# Altium footprint library MY_LIB_Connectors.PcbLib: 358 footprints (part 19 of 23)
Each footprint in its own frame and in the unit in brackets; x right, y up, seen from the top. Pads: shape width x height; smd on the part's side, far side on the other; paste and mask are expansions set on the pad; w line width, h text height; cw(c..) or ccw(c..) is an arc to the next point about the centre after c.
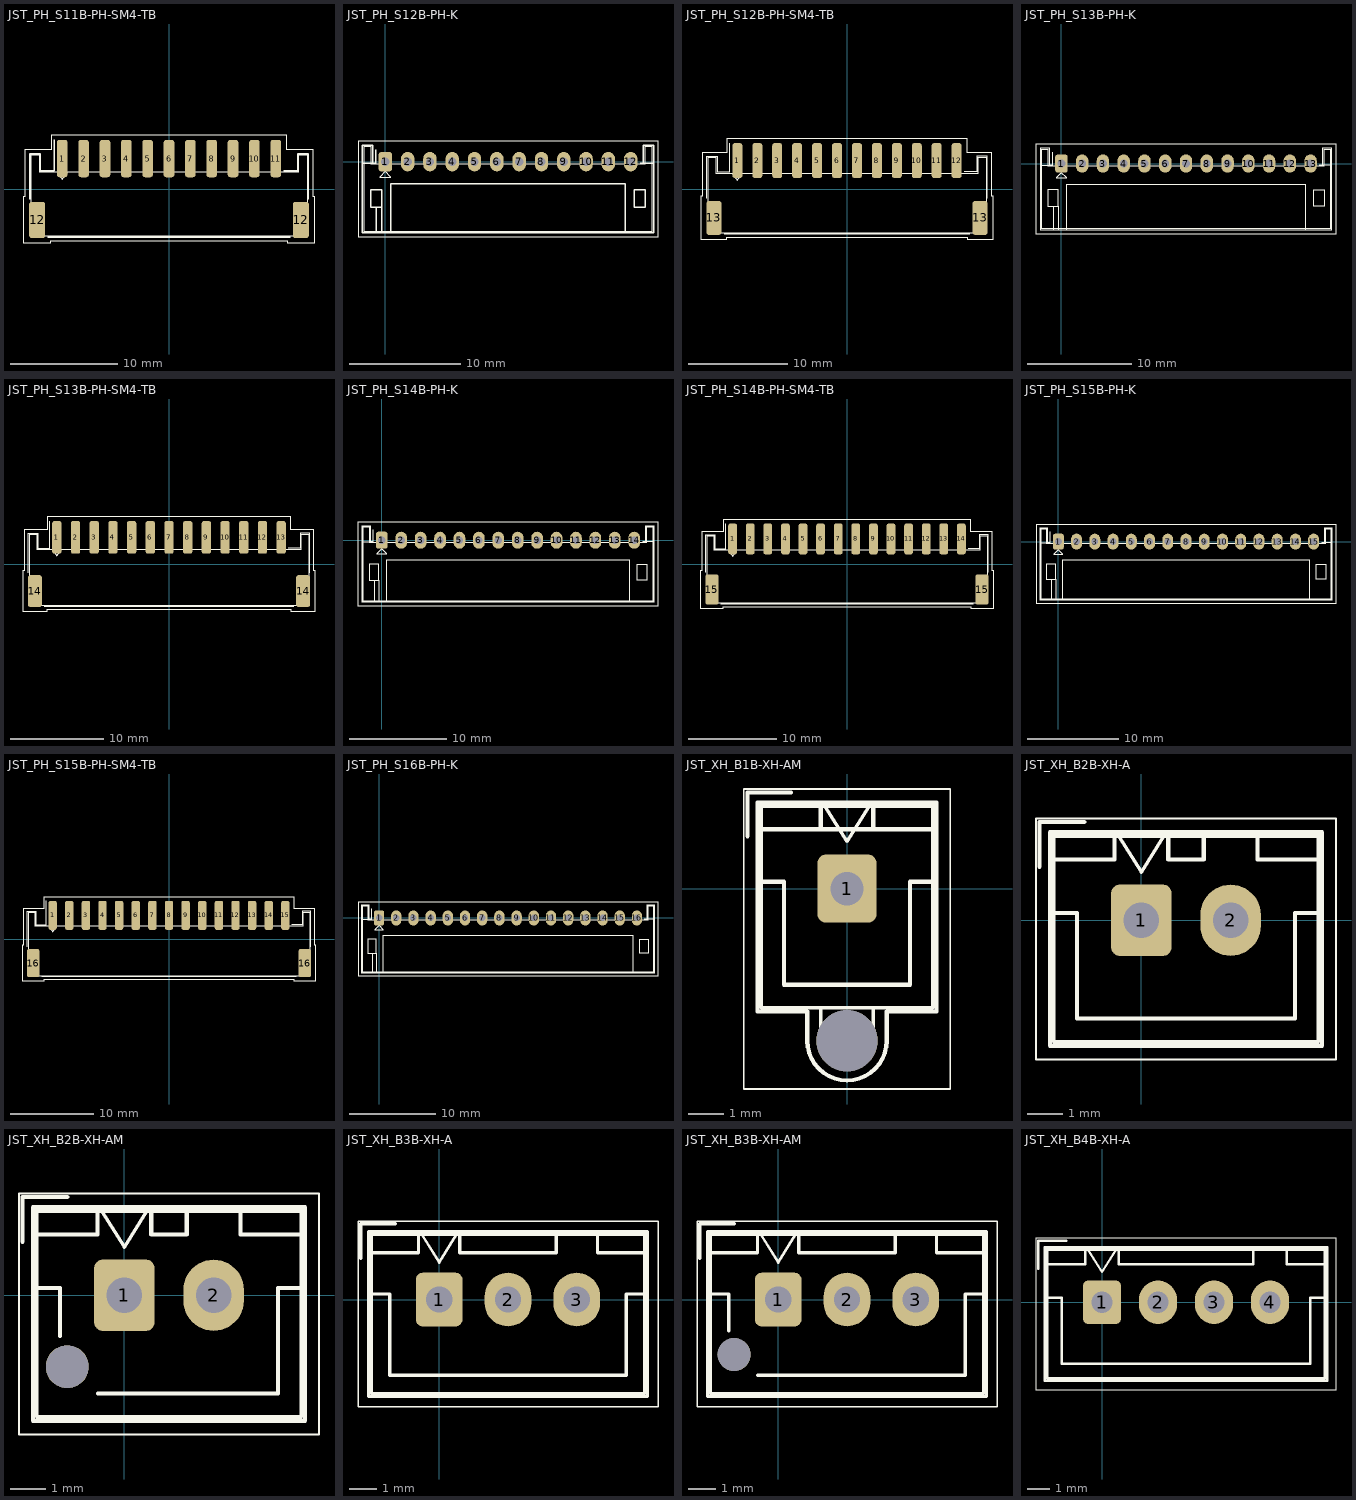
[diagram p18: the footprints below, top view; thin cyan lines are the x and y axes]

## JST_PH_S11B-PH-SM4-TB [mm] "JST S11B-PH-SM4-TB; reviewed KiCad footprint; ready STEP reference model"
height 5.588
pads (13):
  rrect50% 1x3.5 all layers, no hole: 1(-10,2.85) 2(-8,2.85) 3(-6,2.85) 4(-4,2.85) 5(-2,2.85) 6(0,2.85) 7(2,2.85) 8(4,2.85) 9(6,2.85) 10(8,2.85) 11(10,2.85)
  rrect33% 1.5x3.4 all layers, no hole: 12(-12.35,-2.9) 12(12.35,-2.9)
Top Overlay:
  lines w0.05: -13.6,-5.1 -13.6,-0.69 -13.45,-0.69 -13.45,3.7 -11,3.7 -11,5.1 11,5.1 11,3.7 13.45,3.7 13.45,-0.69 13.6,-0.69 13.6,-5.1 11.1,-5.1 11.1,-4.9 -11.1,-4.9 -11.1,-5.1 -13.6,-5.1
  lines w0.1: -10.5,1.6 -10,0.893 -9.5,1.6 ; -12.95,-4.4 -12.95,3.2 -12.15,3.2 -12.15,1.6 12.15,1.6 12.15,3.2 12.95,3.2 12.95,-4.4 -12.95,-4.4
  lines w0.12: -13.06,-0.94 -13.06,3.31 -12.04,3.31 -12.04,1.71 -10.76,1.71 -10.76,4.6 ; -11.34,-4.51 11.34,-4.51 ; 10.76,1.71 12.04,1.71 12.04,3.31 13.06,3.31 13.06,-0.94
3D body "s11b-ph-sm4-tb.step": height 5.59, standoff 0, extent -12.95,-4.4 12.95,3.2

## JST_PH_S12B-PH-K [mm] "JST S12B-PH-K; reviewed KiCad footprint; ready STEP reference model"
height 4.85
pads (12):
  rrect42% 1.2x1.75 hole 0.75: 1(0,0)
  oval 1.2x1.75 hole 0.75: 2(2,0) 3(4,0) 4(6,0) 5(8,0) 6(10,0) 7(12,0) 8(14,0) 9(16,0) 10(18,0) 11(20,0) 12(22,0)
Top Overlay:
  lines w0.05: -2.45,-6.75 -2.45,1.85 24.45,1.85 24.45,-6.75 -2.45,-6.75
  lines w0.1: -1.95,-6.25 -1.95,1.35 -1.25,1.35 -1.25,-0.25 23.25,-0.25 23.25,1.35 23.95,1.35 23.95,-6.25 -1.95,-6.25 ; -0.5,-1.375 0.5,-1.375 0,-0.875 -0.5,-1.375
  lines w0.12: -2.06,-0.14 -1.14,-0.14 ; -0.86,1.075 -0.86,-0.14 -1.14,-0.14 ; -0.8,-6.36 -0.8,-4.1 ; -0.3,-6.36 -0.3,-4.1 ; 0.5,-6.36 0.5,-2 21.5,-2 21.5,-6.36 ; 22.86,-0.14 23.14,-0.14 ; 24.06,-0.14 23.14,-0.14 ; -1.14,-0.14 -1.14,1.46 -2.06,1.46 -2.06,-6.36 24.06,-6.36 24.06,1.46 23.14,1.46 23.14,-0.14 ; -0.3,-4.1 -1.3,-4.1 -1.3,-2.5 -0.3,-2.5 -0.3,-4.1 ; 22.3,-4.1 22.3,-2.5 23.3,-2.5 23.3,-4.1 22.3,-4.1
3D body "JST_PH_S12B-PH-K_1x12_P2.00mm_Horizontal.step": height 4.85, standoff -3.4, extent -1.95,-6.25 23.95,1.35

## JST_PH_S12B-PH-SM4-TB [mm] "JST S12B-PH-SM4-TB; reviewed KiCad footprint; ready STEP reference model"
height 5.588
pads (14):
  rrect50% 1x3.5 all layers, no hole: 1(-11,2.85) 2(-9,2.85) 3(-7,2.85) 4(-5,2.85) 5(-3,2.85) 6(-1,2.85) 7(1,2.85) 8(3,2.85) 9(5,2.85) 10(7,2.85) 11(9,2.85) 12(11,2.85)
  rrect33% 1.5x3.4 all layers, no hole: 13(-13.35,-2.9) 13(13.35,-2.9)
Top Overlay:
  lines w0.05: -14.6,-5.1 -14.6,-0.69 -14.45,-0.69 -14.45,3.7 -12,3.7 -12,5.1 12,5.1 12,3.7 14.45,3.7 14.45,-0.69 14.6,-0.69 14.6,-5.1 12.1,-5.1 12.1,-4.9 -12.1,-4.9 -12.1,-5.1 -14.6,-5.1
  lines w0.1: -11.5,1.6 -11,0.893 -10.5,1.6 ; -13.95,-4.4 -13.95,3.2 -13.15,3.2 -13.15,1.6 13.15,1.6 13.15,3.2 13.95,3.2 13.95,-4.4 -13.95,-4.4
  lines w0.12: -14.06,-0.94 -14.06,3.31 -13.04,3.31 -13.04,1.71 -11.76,1.71 -11.76,4.6 ; -12.34,-4.51 12.34,-4.51 ; 11.76,1.71 13.04,1.71 13.04,3.31 14.06,3.31 14.06,-0.94
3D body "s12b-ph-sm4-tb.step": height 5.59, standoff 0, extent -13.95,-4.4 13.95,3.2

## JST_PH_S13B-PH-K [mm] "JST S13B-PH-K; reviewed KiCad footprint; ready STEP reference model"
height 4.85
pads (13):
  rrect42% 1.2x1.75 hole 0.75: 1(0,0)
  oval 1.2x1.75 hole 0.75: 2(2,0) 3(4,0) 4(6,0) 5(8,0) 6(10,0) 7(12,0) 8(14,0) 9(16,0) 10(18,0) 11(20,0) 12(22,0) 13(24,0)
Top Overlay:
  lines w0.05: -2.45,-6.75 -2.45,1.85 26.45,1.85 26.45,-6.75 -2.45,-6.75
  lines w0.1: -1.95,-6.25 -1.95,1.35 -1.25,1.35 -1.25,-0.25 25.25,-0.25 25.25,1.35 25.95,1.35 25.95,-6.25 -1.95,-6.25 ; -0.5,-1.375 0.5,-1.375 0,-0.875 -0.5,-1.375
  lines w0.12: -2.06,-0.14 -1.14,-0.14 ; -0.86,1.075 -0.86,-0.14 -1.14,-0.14 ; -0.8,-6.36 -0.8,-4.1 ; -0.3,-6.36 -0.3,-4.1 ; 0.5,-6.36 0.5,-2 23.5,-2 23.5,-6.36 ; 24.86,-0.14 25.14,-0.14 ; 26.06,-0.14 25.14,-0.14 ; -1.14,-0.14 -1.14,1.46 -2.06,1.46 -2.06,-6.36 26.06,-6.36 26.06,1.46 25.14,1.46 25.14,-0.14 ; -0.3,-4.1 -1.3,-4.1 -1.3,-2.5 -0.3,-2.5 -0.3,-4.1 ; 24.3,-4.1 24.3,-2.5 25.3,-2.5 25.3,-4.1 24.3,-4.1
3D body "JST_PH_S13B-PH-K_1x13_P2.00mm_Horizontal.step": height 4.85, standoff -3.4, extent -1.95,-6.25 25.95,1.35

## JST_PH_S13B-PH-SM4-TB [mm] "JST S13B-PH-SM4-TB; reviewed KiCad footprint; ready STEP reference model"
height 5.588
pads (15):
  rrect50% 1x3.5 all layers, no hole: 1(-12,2.85) 2(-10,2.85) 3(-8,2.85) 4(-6,2.85) 5(-4,2.85) 6(-2,2.85) 7(0,2.85) 8(2,2.85) 9(4,2.85) 10(6,2.85) 11(8,2.85) 12(10,2.85) 13(12,2.85)
  rrect33% 1.5x3.4 all layers, no hole: 14(-14.35,-2.9) 14(14.35,-2.9)
Top Overlay:
  lines w0.05: -15.6,-5.1 -15.6,-0.69 -15.45,-0.69 -15.45,3.7 -13,3.7 -13,5.1 13,5.1 13,3.7 15.45,3.7 15.45,-0.69 15.6,-0.69 15.6,-5.1 13.1,-5.1 13.1,-4.9 -13.1,-4.9 -13.1,-5.1 -15.6,-5.1
  lines w0.1: -12.5,1.6 -12,0.893 -11.5,1.6 ; -14.95,-4.4 -14.95,3.2 -14.15,3.2 -14.15,1.6 14.15,1.6 14.15,3.2 14.95,3.2 14.95,-4.4 -14.95,-4.4
  lines w0.12: -15.06,-0.94 -15.06,3.31 -14.04,3.31 -14.04,1.71 -12.76,1.71 -12.76,4.6 ; -13.34,-4.51 13.34,-4.51 ; 12.76,1.71 14.04,1.71 14.04,3.31 15.06,3.31 15.06,-0.94
3D body "s13b-ph-sm4-tb.step": height 5.59, standoff 0, extent -14.95,-4.4 14.95,3.2

## JST_PH_S14B-PH-K [mm] "JST S14B-PH-K; reviewed KiCad footprint; ready STEP reference model"
height 4.85
pads (14):
  rrect42% 1.2x1.75 hole 0.75: 1(0,0)
  oval 1.2x1.75 hole 0.75: 2(2,0) 3(4,0) 4(6,0) 5(8,0) 6(10,0) 7(12,0) 8(14,0) 9(16,0) 10(18,0) 11(20,0) 12(22,0) 13(24,0) 14(26,0)
Top Overlay:
  lines w0.05: -2.45,-6.75 -2.45,1.85 28.45,1.85 28.45,-6.75 -2.45,-6.75
  lines w0.1: -1.95,-6.25 -1.95,1.35 -1.25,1.35 -1.25,-0.25 27.25,-0.25 27.25,1.35 27.95,1.35 27.95,-6.25 -1.95,-6.25 ; -0.5,-1.375 0.5,-1.375 0,-0.875 -0.5,-1.375
  lines w0.12: -2.06,-0.14 -1.14,-0.14 ; -0.86,1.075 -0.86,-0.14 -1.14,-0.14 ; -0.8,-6.36 -0.8,-4.1 ; -0.3,-6.36 -0.3,-4.1 ; 0.5,-6.36 0.5,-2 25.5,-2 25.5,-6.36 ; 26.86,-0.14 27.14,-0.14 ; 28.06,-0.14 27.14,-0.14 ; -1.14,-0.14 -1.14,1.46 -2.06,1.46 -2.06,-6.36 28.06,-6.36 28.06,1.46 27.14,1.46 27.14,-0.14 ; -0.3,-4.1 -1.3,-4.1 -1.3,-2.5 -0.3,-2.5 -0.3,-4.1 ; 26.3,-4.1 26.3,-2.5 27.3,-2.5 27.3,-4.1 26.3,-4.1
3D body "JST_PH_S14B-PH-K_1x14_P2.00mm_Horizontal.step": height 4.85, standoff -3.4, extent -1.95,-6.25 27.95,1.35

## JST_PH_S14B-PH-SM4-TB [mm] "JST S14B-PH-SM4-TB; reviewed KiCad footprint; ready STEP reference model"
height 5.588
pads (16):
  rrect50% 1x3.5 all layers, no hole: 1(-13,2.85) 2(-11,2.85) 3(-9,2.85) 4(-7,2.85) 5(-5,2.85) 6(-3,2.85) 7(-1,2.85) 8(1,2.85) 9(3,2.85) 10(5,2.85) 11(7,2.85) 12(9,2.85) 13(11,2.85) 14(13,2.85)
  rrect33% 1.5x3.4 all layers, no hole: 15(-15.35,-2.9) 15(15.35,-2.9)
Top Overlay:
  lines w0.05: -16.6,-5.1 -16.6,-0.69 -16.45,-0.69 -16.45,3.7 -14,3.7 -14,5.1 14,5.1 14,3.7 16.45,3.7 16.45,-0.69 16.6,-0.69 16.6,-5.1 14.1,-5.1 14.1,-4.9 -14.1,-4.9 -14.1,-5.1 -16.6,-5.1
  lines w0.1: -13.5,1.6 -13,0.893 -12.5,1.6 ; -15.95,-4.4 -15.95,3.2 -15.15,3.2 -15.15,1.6 15.15,1.6 15.15,3.2 15.95,3.2 15.95,-4.4 -15.95,-4.4
  lines w0.12: -16.06,-0.94 -16.06,3.31 -15.04,3.31 -15.04,1.71 -13.76,1.71 -13.76,4.6 ; -14.34,-4.51 14.34,-4.51 ; 13.76,1.71 15.04,1.71 15.04,3.31 16.06,3.31 16.06,-0.94
3D body "s14b-ph-sm4-tb.step": height 5.59, standoff 0, extent -15.95,-4.4 15.95,3.2

## JST_PH_S15B-PH-K [mm] "JST S15B-PH-K; reviewed KiCad footprint; ready STEP reference model"
height 4.85
pads (15):
  rrect42% 1.2x1.75 hole 0.75: 1(0,0)
  oval 1.2x1.75 hole 0.75: 2(2,0) 3(4,0) 4(6,0) 5(8,0) 6(10,0) 7(12,0) 8(14,0) 9(16,0) 10(18,0) 11(20,0) 12(22,0) 13(24,0) 14(26,0) 15(28,0)
Top Overlay:
  lines w0.05: -2.45,-6.75 -2.45,1.85 30.45,1.85 30.45,-6.75 -2.45,-6.75
  lines w0.1: -1.95,-6.25 -1.95,1.35 -1.25,1.35 -1.25,-0.25 29.25,-0.25 29.25,1.35 29.95,1.35 29.95,-6.25 -1.95,-6.25 ; -0.5,-1.375 0.5,-1.375 0,-0.875 -0.5,-1.375
  lines w0.12: -2.06,-0.14 -1.14,-0.14 ; -0.86,1.075 -0.86,-0.14 -1.14,-0.14 ; -0.8,-6.36 -0.8,-4.1 ; -0.3,-6.36 -0.3,-4.1 ; 0.5,-6.36 0.5,-2 27.5,-2 27.5,-6.36 ; 28.86,-0.14 29.14,-0.14 ; 30.06,-0.14 29.14,-0.14 ; -1.14,-0.14 -1.14,1.46 -2.06,1.46 -2.06,-6.36 30.06,-6.36 30.06,1.46 29.14,1.46 29.14,-0.14 ; -0.3,-4.1 -1.3,-4.1 -1.3,-2.5 -0.3,-2.5 -0.3,-4.1 ; 28.3,-4.1 28.3,-2.5 29.3,-2.5 29.3,-4.1 28.3,-4.1
3D body "JST_PH_S15B-PH-K_1x15_P2.00mm_Horizontal.step": height 4.85, standoff -3.4, extent -1.95,-6.25 29.95,1.35

## JST_PH_S15B-PH-SM4-TB [mm] "JST S15B-PH-SM4-TB; reviewed KiCad footprint; ready STEP reference model"
height 5.588
pads (17):
  rrect50% 1x3.5 all layers, no hole: 1(-14,2.85) 2(-12,2.85) 3(-10,2.85) 4(-8,2.85) 5(-6,2.85) 6(-4,2.85) 7(-2,2.85) 8(0,2.85) 9(2,2.85) 10(4,2.85) 11(6,2.85) 12(8,2.85) 13(10,2.85) 14(12,2.85) 15(14,2.85)
  rrect33% 1.5x3.4 all layers, no hole: 16(-16.35,-2.9) 16(16.35,-2.9)
Top Overlay:
  lines w0.05: -17.6,-5.1 -17.6,-0.69 -17.45,-0.69 -17.45,3.7 -15,3.7 -15,5.1 15,5.1 15,3.7 17.45,3.7 17.45,-0.69 17.6,-0.69 17.6,-5.1 15.1,-5.1 15.1,-4.9 -15.1,-4.9 -15.1,-5.1 -17.6,-5.1
  lines w0.1: -14.5,1.6 -14,0.893 -13.5,1.6 ; -16.95,-4.4 -16.95,3.2 -16.15,3.2 -16.15,1.6 16.15,1.6 16.15,3.2 16.95,3.2 16.95,-4.4 -16.95,-4.4
  lines w0.12: -17.06,-0.94 -17.06,3.31 -16.04,3.31 -16.04,1.71 -14.76,1.71 -14.76,4.6 ; -15.34,-4.51 15.34,-4.51 ; 14.76,1.71 16.04,1.71 16.04,3.31 17.06,3.31 17.06,-0.94
3D body "s15b-ph-sm4-tb.step": height 5.59, standoff 0, extent -16.95,-4.4 16.95,3.2

## JST_PH_S16B-PH-K [mm] "JST S16B-PH-K; reviewed KiCad footprint; ready STEP reference model"
height 4.85
pads (16):
  rrect42% 1.2x1.75 hole 0.75: 1(0,0)
  oval 1.2x1.75 hole 0.75: 2(2,0) 3(4,0) 4(6,0) 5(8,0) 6(10,0) 7(12,0) 8(14,0) 9(16,0) 10(18,0) 11(20,0) 12(22,0) 13(24,0) 14(26,0) 15(28,0) 16(30,0)
Top Overlay:
  lines w0.05: -2.45,-6.75 -2.45,1.85 32.45,1.85 32.45,-6.75 -2.45,-6.75
  lines w0.1: -1.95,-6.25 -1.95,1.35 -1.25,1.35 -1.25,-0.25 31.25,-0.25 31.25,1.35 31.95,1.35 31.95,-6.25 -1.95,-6.25 ; -0.5,-1.375 0.5,-1.375 0,-0.875 -0.5,-1.375
  lines w0.12: -2.06,-0.14 -1.14,-0.14 ; -0.86,1.075 -0.86,-0.14 -1.14,-0.14 ; -0.8,-6.36 -0.8,-4.1 ; -0.3,-6.36 -0.3,-4.1 ; 0.5,-6.36 0.5,-2 29.5,-2 29.5,-6.36 ; 30.86,-0.14 31.14,-0.14 ; 32.06,-0.14 31.14,-0.14 ; -1.14,-0.14 -1.14,1.46 -2.06,1.46 -2.06,-6.36 32.06,-6.36 32.06,1.46 31.14,1.46 31.14,-0.14 ; -0.3,-4.1 -1.3,-4.1 -1.3,-2.5 -0.3,-2.5 -0.3,-4.1 ; 30.3,-4.1 30.3,-2.5 31.3,-2.5 31.3,-4.1 30.3,-4.1
3D body "JST_PH_S16B-PH-K_1x16_P2.00mm_Horizontal.step": height 4.85, standoff -3.4, extent -1.95,-6.25 31.95,1.35

## JST_XH_B1B-XH-AM [mm] "JST B1B-XH-AM; reviewed KiCad footprint; ready STEP reference model"
height 7
pads (2):
  rrect29% 1.7x1.95 hole 0.95: 1(0,0)
  round 1.75 hole 1.75 unplated: ""(0,-4.35)
Top Overlay:
  lines w0.05: -2.95,-5.73 -2.95,2.85 2.95,2.85 2.95,-5.73 -2.95,-5.73
  lines w0.1: -0.625,2.35 0,1.35 0.625,2.35 ; -2.45,-3.4 -2.45,2.35 ; -2.45,-3.4 -2.45,2.35 ; -2.45,-3.4 2.45,-3.4 ; -2.45,-3.4 -0.75,-3.4 -0.75,-4.35 ccw(c0,-4.35) 0.75,-4.35 0.75,-3.4 2.45,-3.4 ; -2.45,2.35 2.45,2.35 ; -2.45,2.35 2.45,2.35 ; 2.45,-3.4 2.45,2.35 ; 2.45,-3.4 2.45,2.35
  lines w0.12: -2.85,1.5 -2.85,2.75 -1.6,2.75 ; -2.55,0.2 -1.8,0.2 -1.8,-2.75 0,-2.75 1.8,-2.75 1.8,0.2 2.55,0.2 ; -0.75,1.7 -2.55,1.7 -2.55,2.45 -0.75,2.45 ; -0.75,1.7 -0.75,2.45 ; -0.75,1.7 -0.75,2.45 ; -0.75,1.7 0.75,1.7 ; -0.75,2.45 0.75,2.45 ; 0.75,1.7 0.75,2.45 ; 0.75,1.7 0.75,2.45 ; 0.75,1.7 2.55,1.7 2.55,2.45 0.75,2.45 ; -2.56,-3.51 -2.56,2.46 2.56,2.46 2.56,-3.51 1.135,-3.51 1.135,-4.35 cw(c0,-4.35) -1.135,-4.35 -1.135,-3.51 -2.56,-3.51
3D body "C20088533.step": height 7, standoff -3.4, extent -2.45,-5.1 2.45,2.35

## JST_XH_B2B-XH-A [mm] "JST B2B-XH-A; reviewed KiCad footprint; ready STEP reference model"
height 7
pads (2):
  rrect29% 1.7x2 hole 1: 1(0,0)
  oval 1.7x2 hole 1: 2(2.5,0)
Top Overlay:
  lines w0.05: -2.95,-3.9 -2.95,2.85 5.45,2.85 5.45,-3.9 -2.95,-3.9
  lines w0.1: -0.625,2.35 0,1.35 0.625,2.35 ; -2.45,-3.4 -2.45,2.35 4.95,2.35 4.95,-3.4 -2.45,-3.4
  lines w0.12: -2.85,1.5 -2.85,2.75 -1.6,2.75 ; -2.55,0.2 -1.8,0.2 -1.8,-2.75 1.25,-2.75 4.3,-2.75 4.3,0.2 5.05,0.2 ; -2.56,-3.51 -2.56,2.46 5.06,2.46 5.06,-3.51 -2.56,-3.51 ; -2.55,1.7 -2.55,2.45 -0.75,2.45 -0.75,1.7 -2.55,1.7 ; 0.75,1.7 0.75,2.45 1.75,2.45 1.75,1.7 0.75,1.7 ; 3.25,1.7 3.25,2.45 5.05,2.45 5.05,1.7 3.25,1.7
3D body "JST_XH_B2B-XH-A_1x02_P2.50mm_Vertical.step": height 7, standoff -3.4, extent -2.45,-3.4 4.95,2.35

## JST_XH_B2B-XH-AM [mm] "JST B2B-XH-AM; reviewed KiCad footprint; ready STEP reference model"
height 7
pads (3):
  rrect29% 1.7x2 hole 1: 1(0,0)
  oval 1.7x2 hole 1: 2(2.5,0)
  round 1.2 hole 1.2 unplated: ""(-1.6,-2)
Top Overlay:
  lines w0.05: -2.95,-3.9 -2.95,2.85 5.45,2.85 5.45,-3.9 -2.95,-3.9
  lines w0.1: -0.625,2.35 0,1.35 0.625,2.35 ; -2.45,-3.4 -2.45,2.35 4.95,2.35 4.95,-3.4 -2.45,-3.4
  lines w0.12: -2.85,1.5 -2.85,2.75 -1.6,2.75 ; -2.55,0.2 -1.8,0.2 -1.8,-1.14 ; -0.74,-2.75 1.25,-2.75 4.3,-2.75 4.3,0.2 5.05,0.2 ; -2.56,-3.51 -2.56,2.46 5.06,2.46 5.06,-3.51 -2.56,-3.51 ; -2.55,1.7 -2.55,2.45 -0.75,2.45 -0.75,1.7 -2.55,1.7 ; 0.75,1.7 0.75,2.45 1.75,2.45 1.75,1.7 0.75,1.7 ; 3.25,1.7 3.25,2.45 5.05,2.45 5.05,1.7 3.25,1.7
3D body "C161869.step": height 7, standoff -3.4, extent -2.45,-3.4 4.95,2.35

## JST_XH_B3B-XH-A [mm] "JST B3B-XH-A; reviewed KiCad footprint; ready STEP reference model"
height 7
pads (3):
  rrect29% 1.7x1.95 hole 0.95: 1(0,0)
  oval 1.7x1.95 hole 0.95: 2(2.5,0) 3(5,0)
Top Overlay:
  lines w0.05: -2.95,-3.9 -2.95,2.85 7.95,2.85 7.95,-3.9 -2.95,-3.9
  lines w0.1: -0.625,2.35 0,1.35 0.625,2.35 ; -2.45,-3.4 -2.45,2.35 7.45,2.35 7.45,-3.4 -2.45,-3.4
  lines w0.12: -2.85,1.5 -2.85,2.75 -1.6,2.75 ; -2.55,0.2 -1.8,0.2 -1.8,-2.75 2.5,-2.75 6.8,-2.75 6.8,0.2 7.55,0.2 ; -2.56,-3.51 -2.56,2.46 7.56,2.46 7.56,-3.51 -2.56,-3.51 ; -2.55,1.7 -2.55,2.45 -0.75,2.45 -0.75,1.7 -2.55,1.7 ; 0.75,1.7 0.75,2.45 4.25,2.45 4.25,1.7 0.75,1.7 ; 5.75,1.7 5.75,2.45 7.55,2.45 7.55,1.7 5.75,1.7
3D body "JST_XH_B3B-XH-A_1x03_P2.50mm_Vertical.step": height 7, standoff -3.4, extent -2.45,-3.4 7.45,2.35

## JST_XH_B3B-XH-AM [mm] "JST B3B-XH-AM; reviewed KiCad footprint; ready STEP reference model"
height 7
pads (4):
  rrect29% 1.7x1.95 hole 0.95: 1(0,0)
  oval 1.7x1.95 hole 0.95: 2(2.5,0) 3(5,0)
  round 1.2 hole 1.2 unplated: ""(-1.6,-2)
Top Overlay:
  lines w0.05: -2.95,-3.9 -2.95,2.85 7.95,2.85 7.95,-3.9 -2.95,-3.9
  lines w0.1: -0.625,2.35 0,1.35 0.625,2.35 ; -2.45,-3.4 -2.45,2.35 7.45,2.35 7.45,-3.4 -2.45,-3.4
  lines w0.12: -2.85,1.5 -2.85,2.75 -1.6,2.75 ; -2.55,0.2 -1.8,0.2 -1.8,-1.14 ; -0.74,-2.75 2.5,-2.75 6.8,-2.75 6.8,0.2 7.55,0.2 ; -2.56,-3.51 -2.56,2.46 7.56,2.46 7.56,-3.51 -2.56,-3.51 ; -2.55,1.7 -2.55,2.45 -0.75,2.45 -0.75,1.7 -2.55,1.7 ; 0.75,1.7 0.75,2.45 4.25,2.45 4.25,1.7 0.75,1.7 ; 5.75,1.7 5.75,2.45 7.55,2.45 7.55,1.7 5.75,1.7
3D body "C161870.step": height 7, standoff -3.4, extent -2.45,-3.4 7.45,2.35

## JST_XH_B4B-XH-A [mm] "JST B4B-XH-A; reviewed KiCad footprint; ready STEP reference model"
height 7
pads (4):
  rrect29% 1.7x1.95 hole 0.95: 1(0,0)
  oval 1.7x1.95 hole 0.95: 2(2.5,0) 3(5,0) 4(7.5,0)
Top Overlay:
  lines w0.05: -2.95,-3.9 -2.95,2.85 10.45,2.85 10.45,-3.9 -2.95,-3.9
  lines w0.1: -0.625,2.35 0,1.35 0.625,2.35 ; -2.45,-3.4 -2.45,2.35 9.95,2.35 9.95,-3.4 -2.45,-3.4
  lines w0.12: -2.85,1.5 -2.85,2.75 -1.6,2.75 ; -2.55,0.2 -1.8,0.2 -1.8,-2.75 3.75,-2.75 9.3,-2.75 9.3,0.2 10.05,0.2 ; -2.56,-3.51 -2.56,2.46 10.06,2.46 10.06,-3.51 -2.56,-3.51 ; -2.55,1.7 -2.55,2.45 -0.75,2.45 -0.75,1.7 -2.55,1.7 ; 0.75,1.7 0.75,2.45 6.75,2.45 6.75,1.7 0.75,1.7 ; 8.25,1.7 8.25,2.45 10.05,2.45 10.05,1.7 8.25,1.7
3D body "JST_XH_B4B-XH-A_1x04_P2.50mm_Vertical.step": height 7, standoff -3.4, extent -2.45,-3.4 9.95,2.35